# Altium schematic symbol library Micelaneos.SchLib: 12 symbols
Pins are listed as number, name and electrical type; pins without a type are passive.

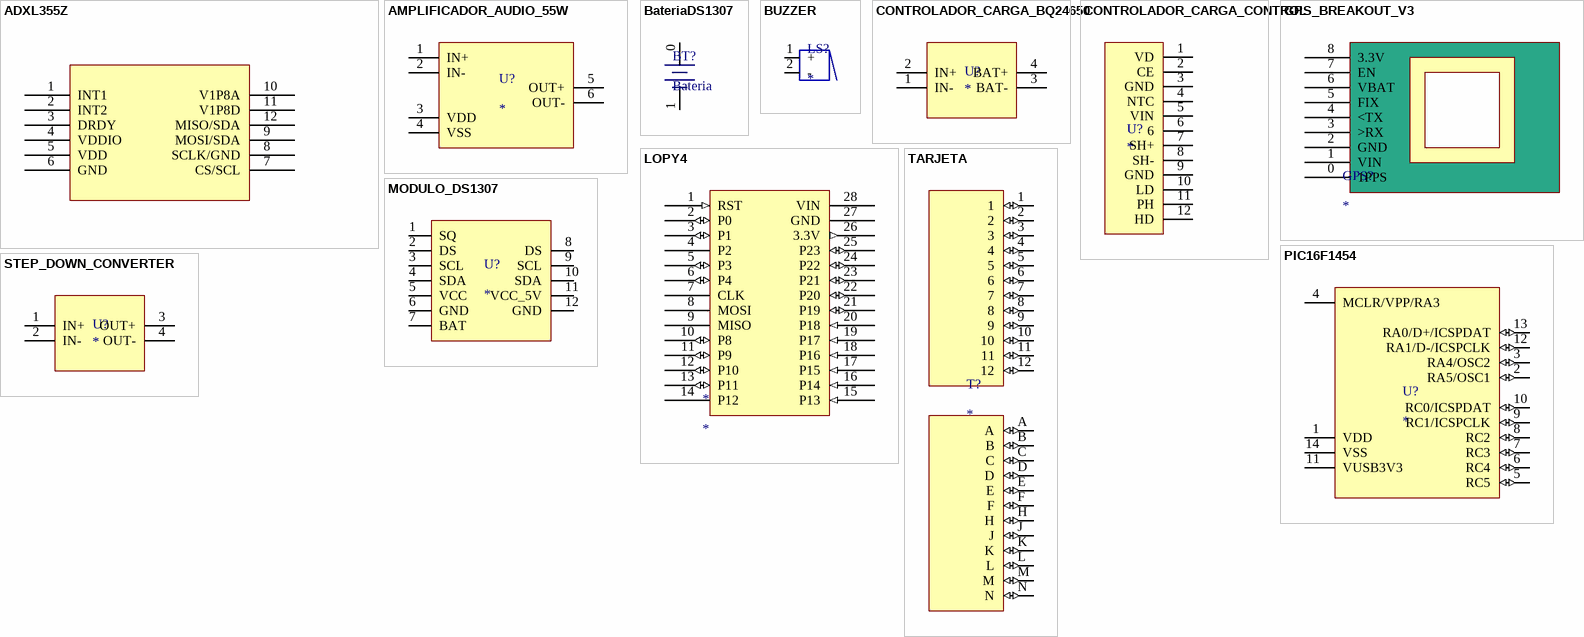
[diagram p0: symbols ADXL355Z to TARJETA]

## ADXL355Z
designator U?
footprint ADXL355Z
pins: 1 INT1, 2 INT2, 3 DRDY, 4 VDDIO, 5 VDD, 6 GND, 7 CS/SCL, 8 SCLK/GND, 9 MOSI/SDA, 10 V1P8A, 11 V1P8D, 12 MISO/SDA

## AMPLIFICADOR_AUDIO_55W
designator U?
Amplificador de audio de 55W
footprint AMPLIFICADOR_AUDIO_55W
pins: 1 IN+ "RG1", 2 IN- "VIN-", 3 VDD (power) "VIN+", 4 VSS "VO", 5 OUT+ (power) "RG2", 6 OUT- "V+"

## BateriaDS1307
designator BT?, comment Bateria
footprint BateriaDS1307
pins: 0 +, 1 -

## BUZZER
designator LS?
footprint BUZZER_11mm
pins: 1 +, 2 -

## CONTROLADOR_CARGA_BQ24650
designator U?
footprint CONTROLADOR_CARGA_BQ24650
pins: 1 IN- (power), 2 IN+ (power), 3 BAT- (power), 4 BAT+ (power)

## CONTROLADOR_CARGA_CONTROL
designator U?
footprint CONTROLADOR_CARGA_CONTROL
pins: 1 VD, 2 CE, 3 GND, 4 NTC, 5 VIN, 6, 7 SH+, 8 SH-, 9 GND, 10 LD, 11 PH, 12 HD

## GPS_BREAKOUT_V3
designator GPS?
footprint GPS_BREAKOUT_V3
pins: 0 1PPS, 1 VIN, 2 GND, 3 >RX, 4 <TX, 5 FIX, 6 VBAT, 7 EN, 8 3.3V

## LOPY4
designator *
pins: 1 RST (in), 2 P0 (io), 3 P1 (io), 4 P2, 5 P3 (io), 6 P4 (io), 7 CLK, 8 MOSI, 9 MISO, 10 P8 (io), 11 P9 (io), 12 P10 (io), 13 P11 (io), 14 P12, 15 P13 (in), 16 P14 (in), 17 P15 (in), 18 P16 (in), 19 P17 (in), 20 P18 (in), 21 P19 (io), 22 P20 (io), 23 P21 (io), 24 P22 (io), 25 P23 (io), 26 3.3V (out), 27 GND (power), 28 VIN (power)

## MODULO_DS1307
designator U?
MODULO DS1307 Y MEMORIA I2C
footprint MODULO_DS1307
pins: 1 SQ, 2 DS, 3 SCL, 4 SDA, 5 VCC, 6 GND, 7 BAT, 8 DS, 9 SCL, 10 SDA, 11 VCC_5V, 12 GND

## PIC16F1454
designator U?
footprint DIP-14
pins: 1 VDD, 2 RA5/OSC1 (io), 3 RA4/OSC2 (io), 4 MCLR/VPP/RA3, 5 RC5 (io), 6 RC4 (io), 7 RC3 (io), 8 RC2 (io), 9 RC1/ICSPCLK (io), 10 RC0/ICSPDAT (io), 11 VUSB3V3, 12 RA1/D-/ICSPCLK (io), 13 RA0/D+/ICSPDAT (io), 14 VSS

## STEP_DOWN_CONVERTER
designator U?
footprint STEP_DOWN_CONVERTER
pins: 1 IN+, 2 IN-, 3 OUT+, 4 OUT-

## TARJETA
designator T?
footprint TARJETA_CONTROLADOR
footprint TARJETA_AMPLIFICADOR
pins: 1 (io), 2 (io), 3 (io), 4 (io), 5 (io), 6 (io), 7 (io), 8 (io), 9 (io), 10 (io), 11 (io), 12 (io), A (io), B (io), C (io), D (io), E (io), F (io), H (io), J (io), K (io), L (io), M (io), N (io)